# Altium footprint library Smart_Station.PcbLib: 2 footprints
Each footprint in its own frame and in the unit in brackets; x right, y up, seen from the top. Pads: shape width x height; smd on the part's side, far side on the other; paste and mask are expansions set on the pad; w line width, h text height; cw(c..) or ccw(c..) is an arc to the next point about the centre after c.
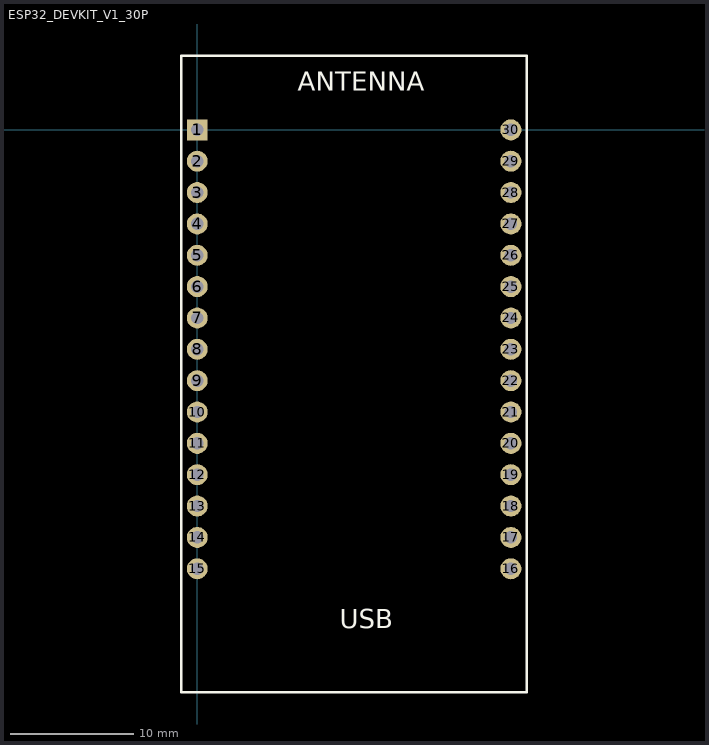
[diagram p0: the footprints below, top view; thin cyan lines are the x and y axes]

## ESP32_DEVKIT_V1_30P [mm]
pads (30):
  rect 1.7x1.7 hole 1: 1(0,0)
  round 1.7 hole 1: 2(0,-2.54) 3(0,-5.08) 4(0,-7.62) 5(0,-10.16) 6(0,-12.7) 7(0,-15.24) 8(0,-17.78) 9(0,-20.32) 10(0,-22.86) 11(0,-25.4) 12(0,-27.94) 13(0,-30.48) 14(0,-33.02) 15(0,-35.56) 16(25.41,-35.56) 17(25.41,-33.02) 18(25.41,-30.48) 19(25.41,-27.94) 20(25.41,-25.4) 21(25.41,-22.86) 22(25.41,-20.32) 23(25.41,-17.78) 24(25.41,-15.24) 25(25.41,-12.7) 26(25.41,-10.16) 27(25.41,-7.62) 28(25.41,-5.08) 29(25.41,-2.54) 30(25.41,0)
Top Overlay:
  lines w0.2: -1.3,-45.56 26.7,-45.56 26.7,6 -1.3,6 -1.3,-45.56
  text "USB" at 11.557,-40.386 h1.52
  text "ANTENNA" at 8.128,3.175 h1.52

## PCBComponent_1 [mm]